# Altium schematic symbol library 2019-09-10_07-03-39.SchLib: 2 symbols
Pins are listed as number, name and electrical type; pins without a type are passive.

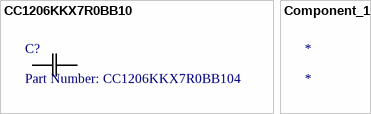
[diagram p0: symbols CC1206KKX7R0BB10 to Component_1]

## CC1206KKX7R0BB10
designator C?, comment Part Number: CC1206KKX7R0BB104
No Description Available; Vendor: Yageo; Built_By: EMA_UL_Team; Type: DEV; Manufacturer_Part_Number: CC1206KKX7R0BB104; Copyright: Copyright (C) 2018 Accelerated Designs. All rights reserved; RefDes: RefDes; Value: Value
footprint YAG_CC1206
pins: 1, 2

## Component_1
designator *